# Altium footprint library ArduinoMega.PcbLib: 1 footprints
Each footprint in its own frame and in the unit in brackets; x right, y up, seen from the top. Pads: shape width x height; smd on the part's side, far side on the other; paste and mask are expansions set on the pad; w line width, h text height; cw(c..) or ccw(c..) is an arc to the next point about the centre after c.
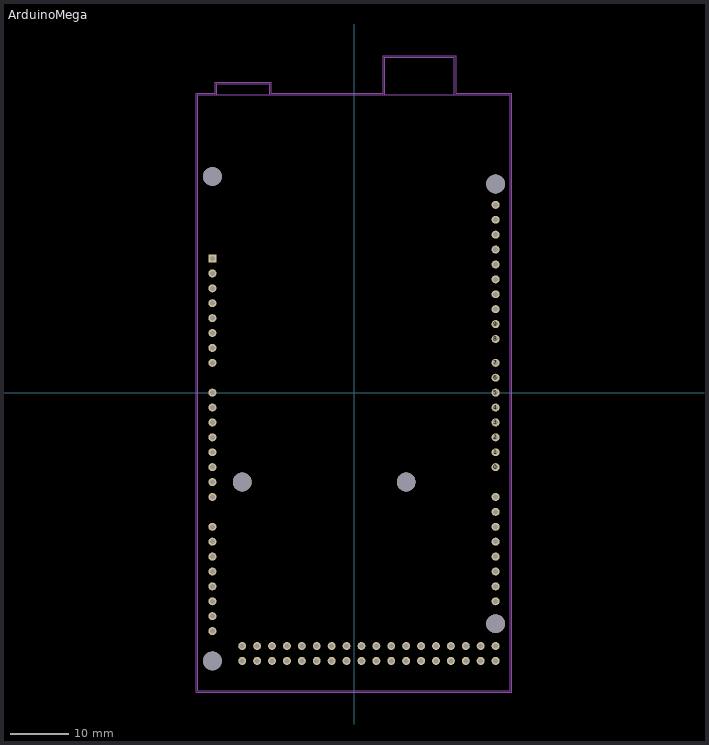
[diagram p0: the footprint, top view; thin cyan lines are the x and y axes]

## ArduinoMega [mm] "ArduinoMega"
pads (92):
  round 1.358 hole 0.85: 0(24.13,-12.7) 1(24.13,-10.16) 2(24.13,-7.62) 3(24.13,-5.08) 3V3(-24.13,15.24) 4(24.13,-2.54) 5(24.13,0) 5V(-24.13,12.7) 5V(24.13,-45.72) 5V(24.13,-43.18) 6(24.13,2.54) 7(24.13,5.08) 8(24.13,9.144) 9(24.13,11.684) 10(24.13,14.224) 11(24.13,16.764) 12(24.13,19.304) 13(24.13,21.844) 14(24.13,-17.78) 15(24.13,-20.32) 16(24.13,-22.86) 17(24.13,-25.4) 18(24.13,-27.94) 19(24.13,-30.48) 20(24.13,-33.02) 21(24.13,-35.56) 22(21.59,-43.18) 23(21.59,-45.72) 24(19.05,-43.18) 25(19.05,-45.72) 26(16.51,-43.18) 27(16.51,-45.72) 28(13.97,-43.18) 29(13.97,-45.72) 30(11.43,-43.18) 31(11.43,-45.72) 32(8.89,-43.18) 33(8.89,-45.72) 34(6.35,-43.18) 35(6.35,-45.72) 36(3.81,-43.18) 37(3.81,-45.72) 38(1.27,-43.18) 39(1.27,-45.72) 40(-1.27,-43.18) 41(-1.27,-45.72) 42(-3.81,-43.18) 43(-3.81,-45.72) 44(-6.35,-43.18) 45(-6.35,-45.72) 46(-8.89,-43.18) 47(-8.89,-45.72) 48(-11.43,-43.18) 49(-11.43,-45.72) 50(-13.97,-43.18) 51(-13.97,-45.72) 52(-16.51,-43.18) 53(-16.51,-45.72) AD0(-24.13,0) AD1(-24.13,-2.54) AD2(-24.13,-5.08) AD3(-24.13,-7.62) AD4(-24.13,-10.16) AD5(-24.13,-12.7) AD6(-24.13,-15.24) AD7(-24.13,-17.78) AD8(-24.13,-22.86) AD9(-24.13,-25.4) AD10(-24.13,-27.94) AD11(-24.13,-30.48) AD12(-24.13,-33.02) AD13(-24.13,-35.56) AD14(-24.13,-38.1) AD15(-24.13,-40.64) AREF(24.13,26.924) GND(-24.13,7.62) GND(-24.13,10.16) GND(-19.05,-45.72) GND(-19.05,-43.18) GND(24.13,24.384) IOREF(-24.13,20.32) RESET(-24.13,17.78) SCL(24.13,32.004) SDA(24.13,29.464) VIN(-24.13,5.08)
  rect 1.358x1.358 hole 0.85: NC(-24.13,22.86)
  round 3.2 hole 3.2 unplated: ""(-24.13,-45.72) ""(-24.13,36.83) ""(-19.05,-15.24) ""(8.89,-15.24) ""(24.13,-39.37) ""(24.13,35.56)
Bottom Overlay:
  lines w0.127: 5.268,50.8 5.268,57.15 17.068,57.15 17.068,50.8 ; -23.37,50.8 -14.378,50.8 ; -23.37,50.8 -23.37,52.61 -14.378,52.61 -14.378,50.8 ; -23.37,50.8 -26.67,50.8 -26.67,-50.8 26.67,-50.8 26.67,50.8 14.02,50.8 2.22,50.8 -14.378,50.8
Mechanical 13:
  lines w0.127: 5.268,50.8 5.268,57.15 17.068,57.15 17.068,50.8 ; -23.37,50.8 -26.67,50.8 -26.67,-50.8 26.67,-50.8 26.67,50.8 14.02,50.8 2.22,50.8 -14.378,50.8 ; -23.37,50.8 -14.378,50.8 ; -23.37,50.8 -23.37,52.61 -14.378,52.61 -14.378,50.8
Mechanical 15:
  lines w0.05: -26.92,-51.05 26.92,-51.05 26.92,51.05 17.399,51.05 17.399,57.4 4.953,57.4 4.953,51.05 -14.128,51.05 -14.128,52.86 -23.62,52.86 -23.62,51.05 -26.92,51.05 -26.92,-51.05
3D body "18pinsS.STEP": height 2.49, standoff -9.01, extent -20.32,-46.95 25.4,-41.95
3D body "10pins.stp": height 2.49, standoff -9.01, extent 22.88,7.874 25.38,33.274
3D body "8pins.step": height 2.54, standoff -9, extent -25.487,-42.017 -22.987,-21.737
3D body "8pins.step": height 2.54, standoff -9, extent 22.9,-36.81 25.4,-16.53
3D body "8pins.step": height 2.54, standoff -9, extent 22.9,-13.95 25.4,6.33
3D body "8pins.step": height 2.54, standoff -9, extent -25.4,-19.03 -22.9,1.25
3D body "8pins.step": height 2.54, standoff -9, extent -25.38,3.85 -22.88,24.13
3D body "ArduinoMega.STEP": height -0.1, standoff -16.33, extent -26.5,-51 26.5,57